# Altium schematic symbol library SN74LVC1G17DBVT.SchLib: 1 symbol
Pins are listed as number, name and electrical type; pins without a type are passive.

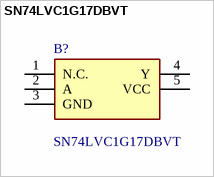
[diagram p0: symbol SN74LVC1G17DBVT]

## SN74LVC1G17DBVT
designator B?
Single Schmitt-Trigger Buffer; Manufacturer_Name: Texas Instruments; Geometry.Height: 1.45mm; Mouser Part Number: 595-SN74LVC1G17DBVT; Mouser Price/Stock: https://www.mouser.co.uk/ProductDetail/Texas-Instruments/SN74LVC1G17DBVT?qs=pajgIaoyDUjLdDGl76l3mA%3D%3D; Manufacturer_Part_Number: SN74LVC1G17DBVT; Datasheet Link: http://www.ti.com/lit/gpn/sn74lvc1g17
footprint SOT95P280X145-5N
pins: 1 N.C., 2 A, 3 GND, 4 Y, 5 VCC